# Altium footprint library PCB1.PcbLib: 21 footprints (part 1 of 2)
Each footprint in its own frame and in the unit in brackets; x right, y up, seen from the top. Pads: shape width x height; smd on the part's side, far side on the other; paste and mask are expansions set on the pad; w line width, h text height; cw(c..) or ccw(c..) is an arc to the next point about the centre after c.
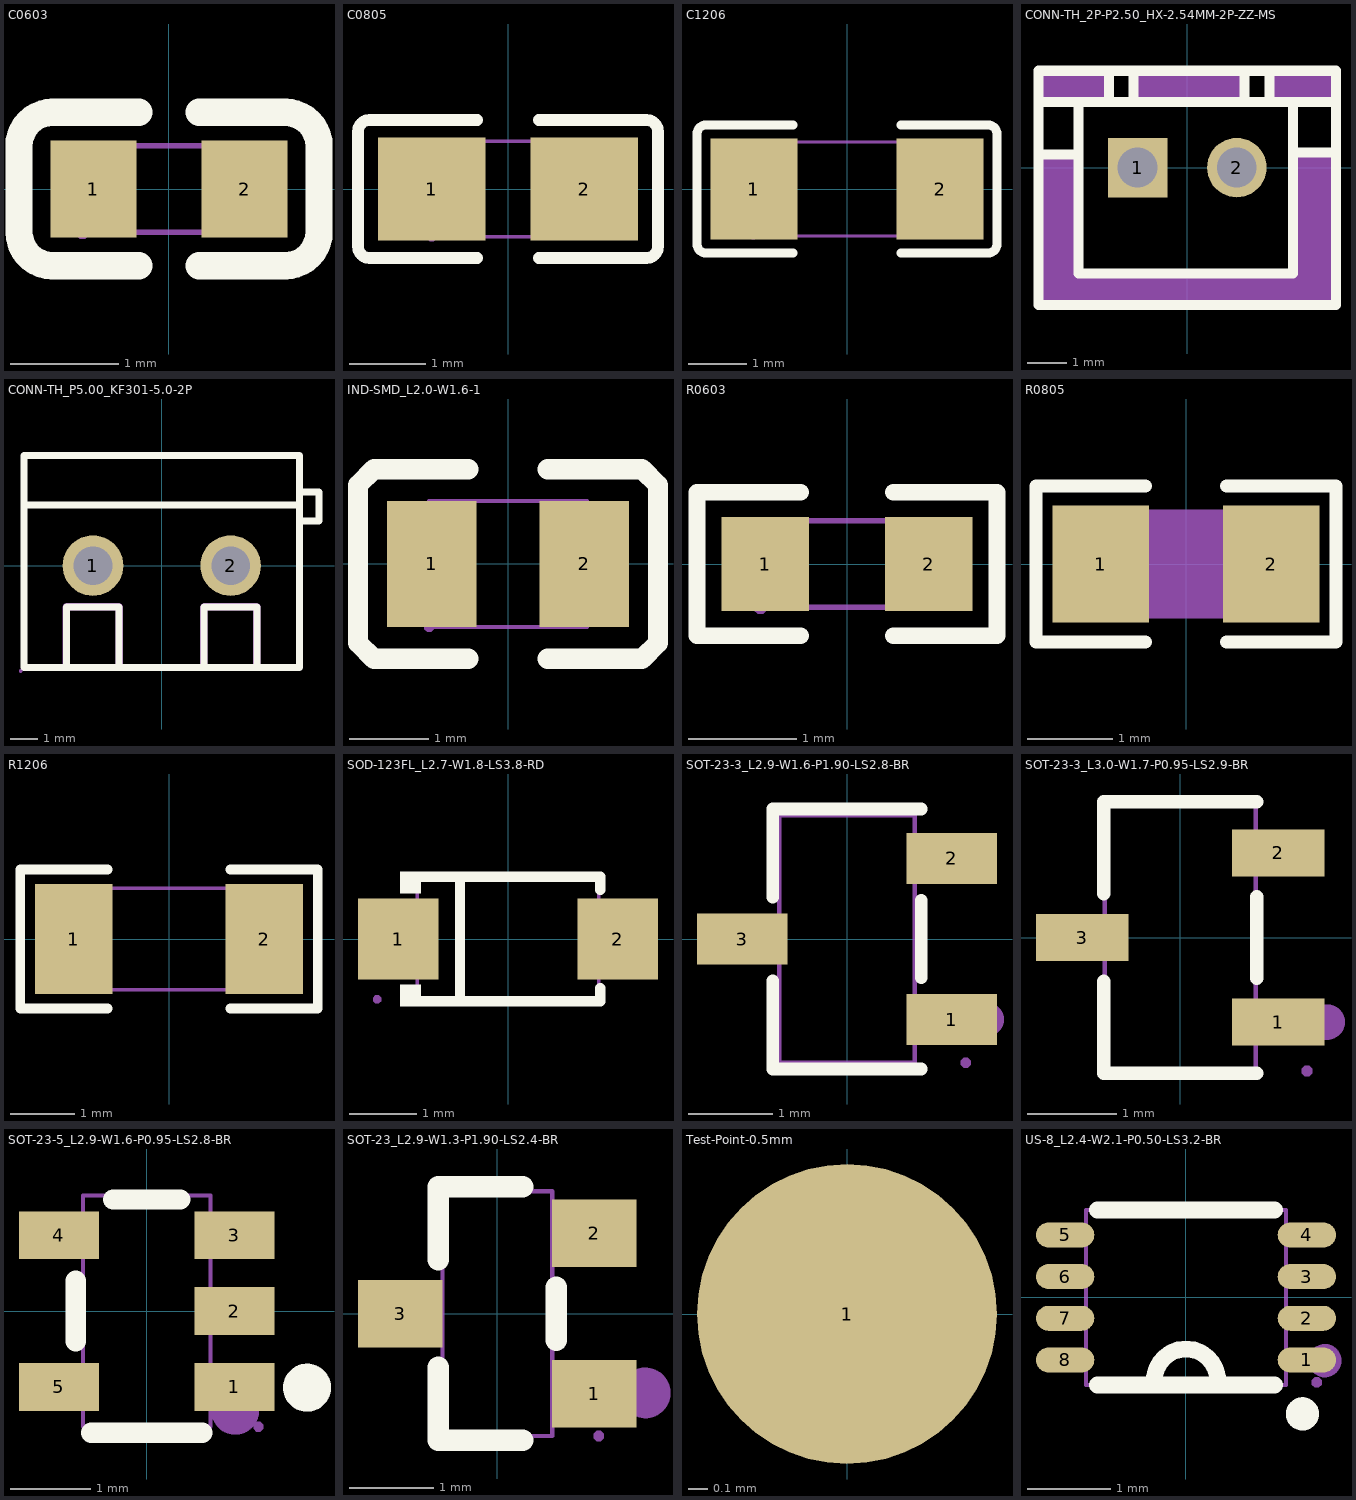
[diagram p0: the footprints below, top view; thin cyan lines are the x and y axes]

## C0603 [mm]
pads (2):
  rect 0.8x0.9 smd: 1(-0.7,0) 2(0.7,0)
Top Overlay:
  lines w0.254: -1.08,-0.71 -0.28,-0.71 ; -1.08,0.71 -0.28,0.71 ; -1.08,-0.71 cw(c-1.08,-0.4) -1.39,-0.4 -1.39,0.4 cw(c-1.08,0.4) -1.08,0.71 ; 0.28,-0.71 1.08,-0.71 ccw(c1.08,-0.4) 1.39,-0.4 1.39,0.4 ccw(c1.08,0.4) 1.08,0.71 0.28,0.71
Mechanical 7:
  lines w0.051: -0.8,-0.4 0.8,-0.4 0.8,0.4 -0.8,0.4 -0.8,-0.4
Mechanical 8:
  region: -0.74,-0.4 -0.74,-0.425 -0.775,-0.46 -0.825,-0.46 -0.86,-0.425 -0.86,-0.4 -0.86,-0.375 -0.825,-0.34 -0.775,-0.34 -0.74,-0.375 -0.74,-0.4
Mechanical 9:
  region: 0.8,-0.4 0.8,0.4 0.5,0.4 0.5,-0.4
  region: -0.8,-0.4 -0.8,0.4 -0.5,0.4 -0.5,-0.4

## C0805 [mm]
pads (2):
  rect 1.41x1.35 smd paste-100 mask+0.051: 1(-1,0) 2(1,0)
Top Overlay:
  lines w0.152: -0.401,-0.904 -1.811,-0.904 cw(c-1.811,-0.751) -1.964,-0.751 -1.964,0.751 cw(c-1.811,0.751) -1.811,0.904 -0.401,0.904 ; 0.401,-0.904 1.811,-0.904 ccw(c1.811,-0.751) 1.964,-0.751 1.964,0.751 ccw(c1.811,0.751) 1.811,0.904 0.401,0.904
Top Paste:
  region: 1.705,0.64 1.705,-0.64 1.655,-0.69 0.505,-0.69 0.455,-0.64 0.45,-0.23 0.9,-0.23 0.9,0.22 0.46,0.22 0.455,0.64 0.505,0.69 1.655,0.69
  region: -1.705,-0.64 -1.705,0.64 -1.655,0.69 -0.505,0.69 -0.455,0.64 -0.45,0.23 -0.9,0.23 -0.9,-0.22 -0.46,-0.22 -0.455,-0.64 -0.505,-0.69 -1.655,-0.69
Mechanical 7:
  lines w0.051: -1,-0.625 1,-0.625 1,0.625 -1,0.625 -1,-0.625
Mechanical 8:
  region: -0.94,-0.625 -0.94,-0.65 -0.975,-0.685 -1.025,-0.685 -1.06,-0.65 -1.06,-0.625 -1.06,-0.6 -1.025,-0.565 -0.975,-0.565 -0.94,-0.6 -0.94,-0.625
Mechanical 9:
  region: 1,0.625 1,-0.625 0.5,-0.625 0.5,0.625
  region: -1,-0.625 -1,0.625 -0.5,0.625 -0.5,-0.625

## C1206 [mm]
pads (2):
  rect 1.485x1.728 smd paste-100 mask+0.051: 1(-1.593,0) 2(1.593,0)
Top Overlay:
  lines w0.152: -0.926,-1.093 -2.411,-1.093 cw(c-2.411,-0.94) -2.564,-0.94 -2.564,0.94 cw(c-2.411,0.94) -2.411,1.093 -0.926,1.093 ; 0.926,-1.093 2.411,-1.093 ccw(c2.411,-0.94) 2.564,-0.94 2.564,0.94 ccw(c2.411,0.94) 2.411,1.093 0.926,1.093
Top Paste:
  region: -0.85,-0.764 -0.85,-0.394 -0.95,-0.294 -1.255,-0.294 -1.355,-0.194 -1.355,0.194 -1.255,0.294 -0.95,0.294 -0.85,0.394 -0.85,0.764 -0.95,0.864 -2.235,0.864 -2.335,0.764 -2.335,-0.764 -2.235,-0.864 -0.95,-0.864
  region: 0.85,-0.764 0.85,-0.394 0.95,-0.294 1.255,-0.294 1.355,-0.194 1.355,0.194 1.255,0.294 0.95,0.294 0.85,0.394 0.85,0.764 0.95,0.864 2.235,0.864 2.335,0.764 2.335,-0.764 2.235,-0.864 0.95,-0.864
Mechanical 7:
  lines w0.051: -1.6,-0.8 1.6,-0.8 1.6,0.8 -1.6,0.8 -1.6,-0.8
Mechanical 8:
  region: -1.54,-0.8 -1.54,-0.825 -1.575,-0.86 -1.625,-0.86 -1.66,-0.825 -1.66,-0.8 -1.66,-0.775 -1.625,-0.74 -1.575,-0.74 -1.54,-0.775 -1.54,-0.8
Mechanical 9:
  region: 1.6,-0.8 1.6,0.8 1.1,0.8 1.1,-0.8
  region: -1.6,-0.8 -1.6,0.8 -1.1,0.8 -1.1,-0.8

## CONN-TH_2P-P2.50_HX-2.54MM-2P-ZZ-MS [mm]
pads (2):
  rect 1.5x1.5 hole 1: 1(-1.25,0)
  round 1.5 hole 1: 2(1.25,0)
Top Overlay:
  lines w0.254: -3.75,0.324 -2.747,0.324 ; -3.75,1.651 -2.667,1.651 ; -1.966,1.651 -1.966,2.44 ; -1.349,1.651 -1.349,2.44 ; 1.442,1.651 1.442,2.44 ; 2.077,1.651 2.077,2.44 ; 2.747,0.381 3.75,0.381 ; 3.75,1.651 2.667,1.651 ; 2.667,1.651 -2.74,1.651 -2.74,-2.667 2.667,-2.667 2.667,1.651 ; -3.75,-3.46 -3.75,2.44 3.75,2.44 3.75,-3.46 -3.75,-3.46
Mechanical 6:
  region: 2.077,2.44 2.077,1.651 3.749,1.651 3.75,1.65 3.75,2.44
  region: -1.349,2.44 -1.349,1.651 1.442,1.651 1.442,2.398 1.4,2.44
  region: -1.95,2.44 -1.95,1.667 -1.966,1.651 -3.75,1.651 -3.75,2.44
  region: 3.75,0.4 2.7,0.4 2.7,-2.65 -2.7,-2.65 -2.7,0.277 -2.75,0.35 -3.75,0.324 -3.75,-3.46 3.75,-3.46
Mechanical 7:
  lines w0.051: -3.75,-3.46 3.75,-3.46 3.75,2.34 -3.75,2.34 -3.75,-3.46
Mechanical 8:
  region: -3.69,-3.46 -3.69,-3.485 -3.725,-3.52 -3.775,-3.52 -3.81,-3.485 -3.81,-3.46 -3.81,-3.435 -3.775,-3.4 -3.725,-3.4 -3.69,-3.435 -3.69,-3.46
Mechanical 9:
  region: -1.57,0.32 -0.93,0.32 -0.93,-0.32 -1.57,-0.32
  region: 0.93,0.32 1.57,0.32 1.57,-0.32 0.93,-0.32

## CONN-TH_P5.00_KF301-5.0-2P [mm]
pads (2):
  round 2.2 hole 1.4 paste-2539.97 mask+0.05: 1(-2.5,0) 2(2.5,0)
Top Overlay:
  lines w0.254: -5,2.201 5,2.201 ; -3.469,-3.701 -3.469,-1.501 -1.549,-1.501 -1.549,-3.701 ; 1.53,-3.7 1.53,-1.5 3.45,-1.5 3.45,-3.7 ; 5.08,1.626 5.708,1.626 5.708,2.667 5.08,2.667 ; -5,-3.7 5,-3.7 5,4 -5,4 -5,-3.7
Mechanical 6:
  region: 1.404,-3.701 1.404,-1.501 1.414,-1.453 1.441,-1.411 1.483,-1.384 1.531,-1.374 3.451,-1.374 3.5,-1.384 3.541,-1.411 3.569,-1.453 3.578,-1.501 3.578,-3.701 3.569,-3.749 3.541,-3.791 3.5,-3.818 3.451,-3.828 3.403,-3.818 3.362,-3.791 3.334,-3.749 3.324,-3.701 3.324,-1.628 1.658,-1.628 1.658,-3.701 1.648,-3.749 1.621,-3.791 1.58,-3.818 1.531,-3.828 1.483,-3.818 1.441,-3.791 1.414,-3.749
  region: -3.596,-3.701 -3.596,-1.501 -3.586,-1.453 -3.559,-1.411 -3.518,-1.384 -3.469,-1.374 -1.549,-1.374 -1.5,-1.384 -1.459,-1.411 -1.431,-1.453 -1.422,-1.501 -1.422,-3.701 -1.431,-3.749 -1.459,-3.791 -1.5,-3.818 -1.549,-3.828 -1.597,-3.818 -1.639,-3.791 -1.666,-3.749 -1.676,-3.701 -1.676,-1.628 -3.342,-1.628 -3.342,-3.701 -3.352,-3.749 -3.379,-3.791 -3.42,-3.818 -3.469,-3.828 -3.518,-3.818 -3.559,-3.791 -3.586,-3.749
Mechanical 7:
  lines w0.051: -5,-3.6 5,-3.6 5,4 -5,4 -5,-3.6
Mechanical 8:
  region: -5.067,-3.827 -5.067,-3.852 -5.102,-3.887 -5.152,-3.887 -5.187,-3.852 -5.187,-3.827 -5.187,-3.802 -5.152,-3.767 -5.102,-3.767 -5.067,-3.802 -5.067,-3.827
Mechanical 9:
  region: -2,0 -2,-0.099 -2.076,-0.283 -2.217,-0.424 -2.401,-0.5 -2.599,-0.5 -2.783,-0.424 -2.924,-0.283 -3,-0.099 -3,0 -3,0.099 -2.924,0.283 -2.783,0.424 -2.599,0.5 -2.401,0.5 -2.217,0.424 -2.076,0.283 -2,0.099 -2,0
  region: 3,0 3,-0.099 2.924,-0.283 2.783,-0.424 2.599,-0.5 2.401,-0.5 2.217,-0.424 2.076,-0.283 2,-0.099 2,0 2,0.099 2.076,0.283 2.217,0.424 2.401,0.5 2.599,0.5 2.783,0.424 2.924,0.283 3,0.099 3,0

## IND-SMD_L2.0-W1.6-1 [mm]
pads (2):
  rect 1.133x1.6 smd: 1(-0.966,0) 2(0.966,0)
Top Overlay:
  lines w0.254: -0.5,-1.2 -1.55,-1.2 -1.7,-1.2 -1.9,-1 -1.9,1 -1.7,1.2 -1.55,1.2 -0.5,1.2 ; 0.5,-1.2 1.55,-1.2 1.7,-1.2 1.9,-1 1.9,1 1.7,1.2 1.55,1.2 0.5,1.2
Mechanical 7:
  lines w0.051: -1,-0.8 1,-0.8 1,0.8 -1,0.8 -1,-0.8
Mechanical 8:
  region: -0.94,-0.8 -0.94,-0.825 -0.975,-0.86 -1.025,-0.86 -1.06,-0.825 -1.06,-0.8 -1.06,-0.775 -1.025,-0.74 -0.975,-0.74 -0.94,-0.775 -0.94,-0.8
Mechanical 9:
  region: -1,0.8 -1,-0.8 -0.5,-0.8 -0.5,0.8
  region: 1,-0.8 1,0.8 0.5,0.8 0.5,-0.8

## R0603 [mm]
pads (2):
  rect 0.806x0.864 smd paste-100 mask+0.051: 1(-0.753,0) 2(0.753,0)
Top Overlay:
  lines w0.152: -0.426,-0.661 -1.385,-0.661 -1.385,0.661 -0.426,0.661 ; 0.426,-0.661 1.385,-0.661 1.385,0.661 0.426,0.661
Top Paste:
  region: -1.195,-0.45 -0.395,-0.45 -0.345,-0.4 -0.345,-0.172 -0.715,-0.172 -0.715,0.158 -0.345,0.158 -0.345,0.4 -0.395,0.45 -1.195,0.45 -1.245,0.4 -1.245,-0.4
  region: 1.195,0.45 0.395,0.45 0.345,0.4 0.345,0.172 0.715,0.172 0.715,-0.158 0.345,-0.158 0.345,-0.4 0.395,-0.45 1.195,-0.45 1.245,-0.4 1.245,0.4
Mechanical 7:
  lines w0.051: -0.8,-0.4 0.8,-0.4 0.8,0.4 -0.8,0.4 -0.8,-0.4
Mechanical 8:
  region: -0.74,-0.4 -0.74,-0.425 -0.775,-0.46 -0.825,-0.46 -0.86,-0.425 -0.86,-0.4 -0.86,-0.375 -0.825,-0.34 -0.775,-0.34 -0.74,-0.375 -0.74,-0.4
Mechanical 9:
  region: 0.8,-0.4 0.8,0.4 0.5,0.4 0.5,-0.4
  region: -0.8,-0.4 -0.8,0.4 -0.5,0.4 -0.5,-0.4

## R0805 [mm]
pads (2):
  rect 1.133x1.377 smd paste-100 mask+0.051: 1(-1,0) 2(1,0)
Top Overlay:
  lines w0.152: -0.476,-0.917 -1.761,-0.917 -1.761,0.917 -0.476,0.917 ; 0.476,-0.917 1.761,-0.917 1.761,0.917 0.476,0.917
Top Paste:
  region: 0.45,-0.64 0.45,-0.22 0.895,-0.22 0.895,0.23 0.455,0.23 0.45,0.64 0.5,0.69 1.65,0.69 1.7,0.64 1.7,-0.64 1.65,-0.69 0.5,-0.69
  region: -1.7,-0.64 -1.7,0.64 -1.65,0.69 -0.5,0.69 -0.45,0.64 -0.445,0.23 -0.895,0.23 -0.895,-0.22 -0.455,-0.22 -0.45,-0.64 -0.5,-0.69 -1.65,-0.69
Mechanical 7:
  region: -1,-0.637 -1,0.637 1,0.637 1,-0.637
Mechanical 8:
  region: -0.97,-0.638 -0.97,-0.65 -0.988,-0.668 -1.012,-0.668 -1.03,-0.65 -1.03,-0.638 -1.03,-0.625 -1.012,-0.608 -0.988,-0.608 -0.97,-0.625 -0.97,-0.638
Mechanical 9:
  region: 1,-0.637 1,0.637 0.6,0.637 0.6,-0.637
  region: -1,-0.637 -1,0.637 -0.6,0.637 -0.6,-0.637

## R1206 [mm]
pads (2):
  rect 1.208x1.701 smd paste-100 mask+0.051: 1(-1.479,0) 2(1.479,0)
Top Overlay:
  lines w0.152: -0.951,-1.079 -2.311,-1.079 -2.311,1.079 -0.951,1.079 ; 0.951,-1.079 2.311,-1.079 2.311,1.079 0.951,1.079
Top Paste:
  region: -0.875,-0.75 -0.875,-0.389 -0.975,-0.289 -1.186,-0.289 -1.286,-0.189 -1.286,0.189 -1.186,0.289 -0.975,0.289 -0.875,0.389 -0.875,0.75 -0.975,0.85 -1.983,0.85 -2.083,0.75 -2.083,-0.75 -1.983,-0.85 -0.975,-0.85
  region: 0.875,-0.75 0.875,-0.389 0.975,-0.289 1.186,-0.289 1.286,-0.189 1.286,0.189 1.186,0.289 0.975,0.289 0.875,0.389 0.875,0.75 0.975,0.85 1.983,0.85 2.083,0.75 2.083,-0.75 1.983,-0.85 0.975,-0.85
Mechanical 7:
  lines w0.051: -1.55,-0.788 1.55,-0.788 1.55,0.788 -1.55,0.788 -1.55,-0.788
Mechanical 8:
  region: -1.49,-0.787 -1.49,-0.812 -1.525,-0.847 -1.575,-0.847 -1.61,-0.812 -1.61,-0.787 -1.61,-0.763 -1.575,-0.727 -1.525,-0.727 -1.49,-0.763 -1.49,-0.787
Mechanical 9:
  region: 1.55,-0.788 1.55,0.788 1.1,0.788 1.1,-0.788
  region: -1.55,-0.788 -1.55,0.788 -1.1,0.788 -1.1,-0.788

## SOD-123FL_L2.7-W1.8-LS3.8-RD [mm]
pads (2):
  rect 1.2x1.2 smd: 1(-1.635,0) 2(1.635,0)
Top Overlay:
  region: -1.3,-1.002 -1.3,-0.682 -1.605,-0.682 -1.605,-1.002
  region: -1.3,1.002 -1.3,0.682 -1.605,0.682 -1.605,1.002
  lines w0.152: -1.376,-0.926 1.376,-0.926 1.376,-0.733 ; -1.376,0.926 1.376,0.926 1.376,0.733 ; -0.717,-0.876 -0.717,0.876
Mechanical 6:
  region: 1.747,-0.384 1.555,-0.384 1.555,0.384 1.747,0.384
  region: 2.035,0.096 2.035,-0.096 1.267,-0.096 1.267,0.096
  region: -2.032,0.127 -2.032,-0.065 -1.264,-0.065 -1.264,0.127
Mechanical 7:
  lines w0.051: -1.35,-0.9 1.35,-0.9 1.35,0.9 -1.35,0.9 -1.35,-0.9
Mechanical 8:
  region: -1.89,-0.9 -1.89,-0.925 -1.925,-0.96 -1.975,-0.96 -2.01,-0.925 -2.01,-0.9 -2.01,-0.875 -1.975,-0.84 -1.925,-0.84 -1.89,-0.875 -1.89,-0.9
Mechanical 9:
  region: -1.95,0.475 -1.15,0.475 -1.15,-0.475 -1.95,-0.475
  region: 1.95,-0.475 1.15,-0.475 1.15,0.475 1.95,0.475

## SOT-23-3_L2.9-W1.6-P1.90-LS2.8-BR [mm]
pads (3):
  rect 1.07x0.6 smd: 1(1.235,-0.95) 2(1.235,0.95) 3(-1.235,0)
Top Overlay:
  lines w0.152: -0.876,-0.495 -0.876,-1.536 0.876,-1.536 ; -0.876,0.495 -0.876,1.536 0.876,1.536 ; 0.876,-0.455 0.876,0.455
Mechanical 6:
  circle w0.2: c1.651,-0.95 r0.1
Mechanical 7:
  lines w0.051: -0.8,-1.46 0.8,-1.46 0.8,1.46 -0.8,1.46 -0.8,-1.46
Mechanical 8:
  region: 1.46,-1.46 1.46,-1.485 1.425,-1.52 1.375,-1.52 1.34,-1.485 1.34,-1.46 1.34,-1.435 1.375,-1.4 1.425,-1.4 1.46,-1.435 1.46,-1.46
Mechanical 9:
  region: -0.95,-0.2 -0.95,0.2 -1.4,0.2 -1.4,-0.2
  region: 0.95,0.75 0.95,1.15 1.4,1.15 1.4,0.75
  region: 0.95,-1.15 0.95,-0.75 1.4,-0.75 1.4,-1.15
Mechanical 10:
  region: -0.96,-0.2 -0.96,0.2 -0.79,0.2 -0.79,-0.2
  region: 0.79,0.75 0.79,1.15 0.96,1.15 0.96,0.75
  region: 0.79,-1.15 0.79,-0.75 0.96,-0.75 0.96,-1.15

## SOT-23-3_L3.0-W1.7-P0.95-LS2.9-BR [mm]
pads (3):
  rect 1.037x0.532 smd: 1(1.101,-0.95) 2(1.101,0.95) 3(-1.101,0)
Top Overlay:
  lines w0.152: -0.859,-0.495 -0.859,-1.526 0.859,-1.526 ; -0.859,0.495 -0.859,1.526 0.859,1.526 ; 0.859,-0.455 0.859,0.455
Mechanical 6:
  circle w0.2: c1.65,-0.95 r0.1
Mechanical 7:
  lines w0.051: -0.85,-1.5 -0.85,1.5 0.85,1.5 0.85,-1.5 -0.85,-1.5
Mechanical 8:
  region: 1.485,-1.5 1.485,-1.525 1.45,-1.56 1.4,-1.56 1.365,-1.525 1.365,-1.5 1.365,-1.475 1.4,-1.44 1.45,-1.44 1.485,-1.475 1.485,-1.5
Mechanical 9:
  region: 1,-1.137 1,-0.762 1.425,-0.762 1.425,-1.137
  region: 1,0.762 1,1.137 1.425,1.137 1.425,0.762
  region: -1.425,-0.188 -1.425,0.188 -1,0.188 -1,-0.188
Mechanical 10:
  region: 0.815,-1.137 0.815,-0.762 1.01,-0.762 1.01,-1.137
  region: 0.815,0.762 0.815,1.137 1.01,1.137 1.01,0.762
  region: -1.01,-0.188 -1.01,0.188 -0.815,0.188 -0.815,-0.188

## SOT-23-5_L2.9-W1.6-P0.95-LS2.8-BR [mm]
pads (5):
  rect 1x0.6 smd paste+0 mask+0.05: 1(1.1,-0.95) 2(1.1,0) 3(1.1,0.95) 4(-1.1,0.95) 5(-1.1,-0.95)
Top Overlay:
  circle w0.3: c2.01,-0.96 r0.15
  lines w0.254: -0.889,-0.381 -0.889,0.381 ; -0.699,-1.524 0.698,-1.524 ; -0.422,1.397 0.422,1.397
Mechanical 6:
  circle w0.3: c1.11,-1.25 r0.15
Mechanical 7:
  lines w0.051: -0.8,-1.45 -0.8,1.45 0.8,1.45 0.8,-1.45 -0.8,-1.45
Mechanical 8:
  region: 1.46,-1.45 1.46,-1.475 1.425,-1.51 1.375,-1.51 1.34,-1.475 1.34,-1.45 1.34,-1.425 1.375,-1.39 1.425,-1.39 1.46,-1.425 1.46,-1.45
Mechanical 9:
  region: 1.4,-0.2 0.95,-0.2 0.95,0.2 1.4,0.2
  region: 1.4,0.75 0.95,0.75 0.95,1.15 1.4,1.15
  region: 1.4,-1.15 0.95,-1.15 0.95,-0.75 1.4,-0.75
  region: -0.95,0.75 -1.4,0.75 -1.4,1.15 -0.95,1.15
  region: -0.95,-1.15 -1.4,-1.15 -1.4,-0.75 -0.95,-0.75
Mechanical 10:
  region: 0.96,-0.2 0.79,-0.2 0.79,0.2 0.96,0.2
  region: 0.96,0.75 0.79,0.75 0.79,1.15 0.96,1.15
  region: 0.96,-1.15 0.79,-1.15 0.79,-0.75 0.96,-0.75
  region: -0.79,0.75 -0.96,0.75 -0.96,1.15 -0.79,1.15
  region: -0.79,-1.15 -0.96,-1.15 -0.96,-0.75 -0.79,-0.75

## SOT-23_L2.9-W1.3-P1.90-LS2.4-BR [mm]
pads (3):
  rect 1x0.8 smd: 1(1.15,-0.95) 2(1.15,0.95) 3(-1.15,0)
Top Overlay:
  lines w0.254: -0.7,-0.636 -0.7,-1.5 0.3,-1.5 ; -0.7,0.636 -0.7,1.5 0.3,1.5 ; 0.7,-0.314 0.7,0.314
Mechanical 6:
  circle w0.3: c1.753,-0.94 r0.15
Mechanical 7:
  lines w0.051: -0.65,-1.45 0.65,-1.45 0.65,1.45 -0.65,1.45 -0.65,-1.45
Mechanical 8:
  region: 1.26,-1.45 1.26,-1.475 1.225,-1.51 1.175,-1.51 1.14,-1.475 1.14,-1.45 1.14,-1.425 1.175,-1.39 1.225,-1.39 1.26,-1.425 1.26,-1.45
Mechanical 9:
  region: -1.2,-0.2 -1.2,0.2 -0.8,0.2 -0.8,-0.2
  region: 0.8,0.75 0.8,1.15 1.2,1.15 1.2,0.75
  region: 0.8,-1.15 0.8,-0.75 1.2,-0.75 1.2,-1.15
Mechanical 10:
  region: -0.81,-0.2 -0.81,0.2 -0.64,0.2 -0.64,-0.2
  region: 0.64,0.75 0.64,1.15 0.81,1.15 0.81,0.75
  region: 0.64,-1.15 0.64,-0.75 0.81,-0.75 0.81,-1.15

## Test-Point-0.5mm [mil]
pads (1):
  round 60 smd: 1(0,0)

## US-8_L2.4-W2.1-P0.50-LS3.2-BR [mm]
pads (8):
  oval 0.7x0.3 smd: 1(1.45,-0.75) 2(1.45,-0.25) 3(1.45,0.25) 4(1.45,0.75) 5(-1.45,0.75) 6(-1.45,0.25) 7(-1.45,-0.25) 8(-1.45,-0.75)
Top Overlay:
  circle w0.2: c1.397,-1.397 r0.1
  lines w0.2: -1.064,-1.05 1.064,-1.05 ; -1.064,1.05 0,1.05 1.064,1.05 ; -0.381,-1.016 cw(c0,-1) 0.381,-1.016
Mechanical 6:
  circle w0.2: c1.666,-0.758 r0.1
Mechanical 7:
  lines w0.051: -1.2,-1.05 1.2,-1.05 1.2,1.05 -1.2,1.05 -1.2,-1.05
Mechanical 8:
  region: 1.63,-1.02 1.63,-1.045 1.595,-1.08 1.545,-1.08 1.51,-1.045 1.51,-1.02 1.51,-0.995 1.545,-0.96 1.595,-0.96 1.63,-0.995 1.63,-1.02
Mechanical 9:
  region: -1.6,-0.855 -1.6,-0.645 -1.25,-0.645 -1.25,-0.855
  region: -1.6,-0.355 -1.6,-0.145 -1.25,-0.145 -1.25,-0.355
  region: -1.6,0.145 -1.6,0.355 -1.25,0.355 -1.25,0.145
  region: -1.6,0.645 -1.6,0.855 -1.25,0.855 -1.25,0.645
  region: 1.25,0.645 1.25,0.855 1.6,0.855 1.6,0.645
  region: 1.25,0.145 1.25,0.355 1.6,0.355 1.6,0.145
  region: 1.25,-0.355 1.25,-0.145 1.6,-0.145 1.6,-0.355
  region: 1.25,-0.855 1.25,-0.645 1.6,-0.645 1.6,-0.855
Mechanical 10:
  region: -1.26,-0.855 -1.26,-0.645 -1.19,-0.645 -1.19,-0.855
  region: -1.26,-0.355 -1.26,-0.145 -1.19,-0.145 -1.19,-0.355
  region: -1.26,0.145 -1.26,0.355 -1.19,0.355 -1.19,0.145
  region: -1.26,0.645 -1.26,0.855 -1.19,0.855 -1.19,0.645
  region: 1.19,0.645 1.19,0.855 1.26,0.855 1.26,0.645
  region: 1.19,0.145 1.19,0.355 1.26,0.355 1.26,0.145
  region: 1.19,-0.355 1.19,-0.145 1.26,-0.145 1.26,-0.355
  region: 1.19,-0.855 1.19,-0.645 1.26,-0.645 1.26,-0.855